# Altium footprint library Batterie_footprint.PcbLib: 67 footprints (part 1 of 5)
Each footprint in its own frame and in the unit in brackets; x right, y up, seen from the top. Pads: shape width x height; smd on the part's side, far side on the other; paste and mask are expansions set on the pad; w line width, h text height; cw(c..) or ccw(c..) is an arc to the next point about the centre after c.
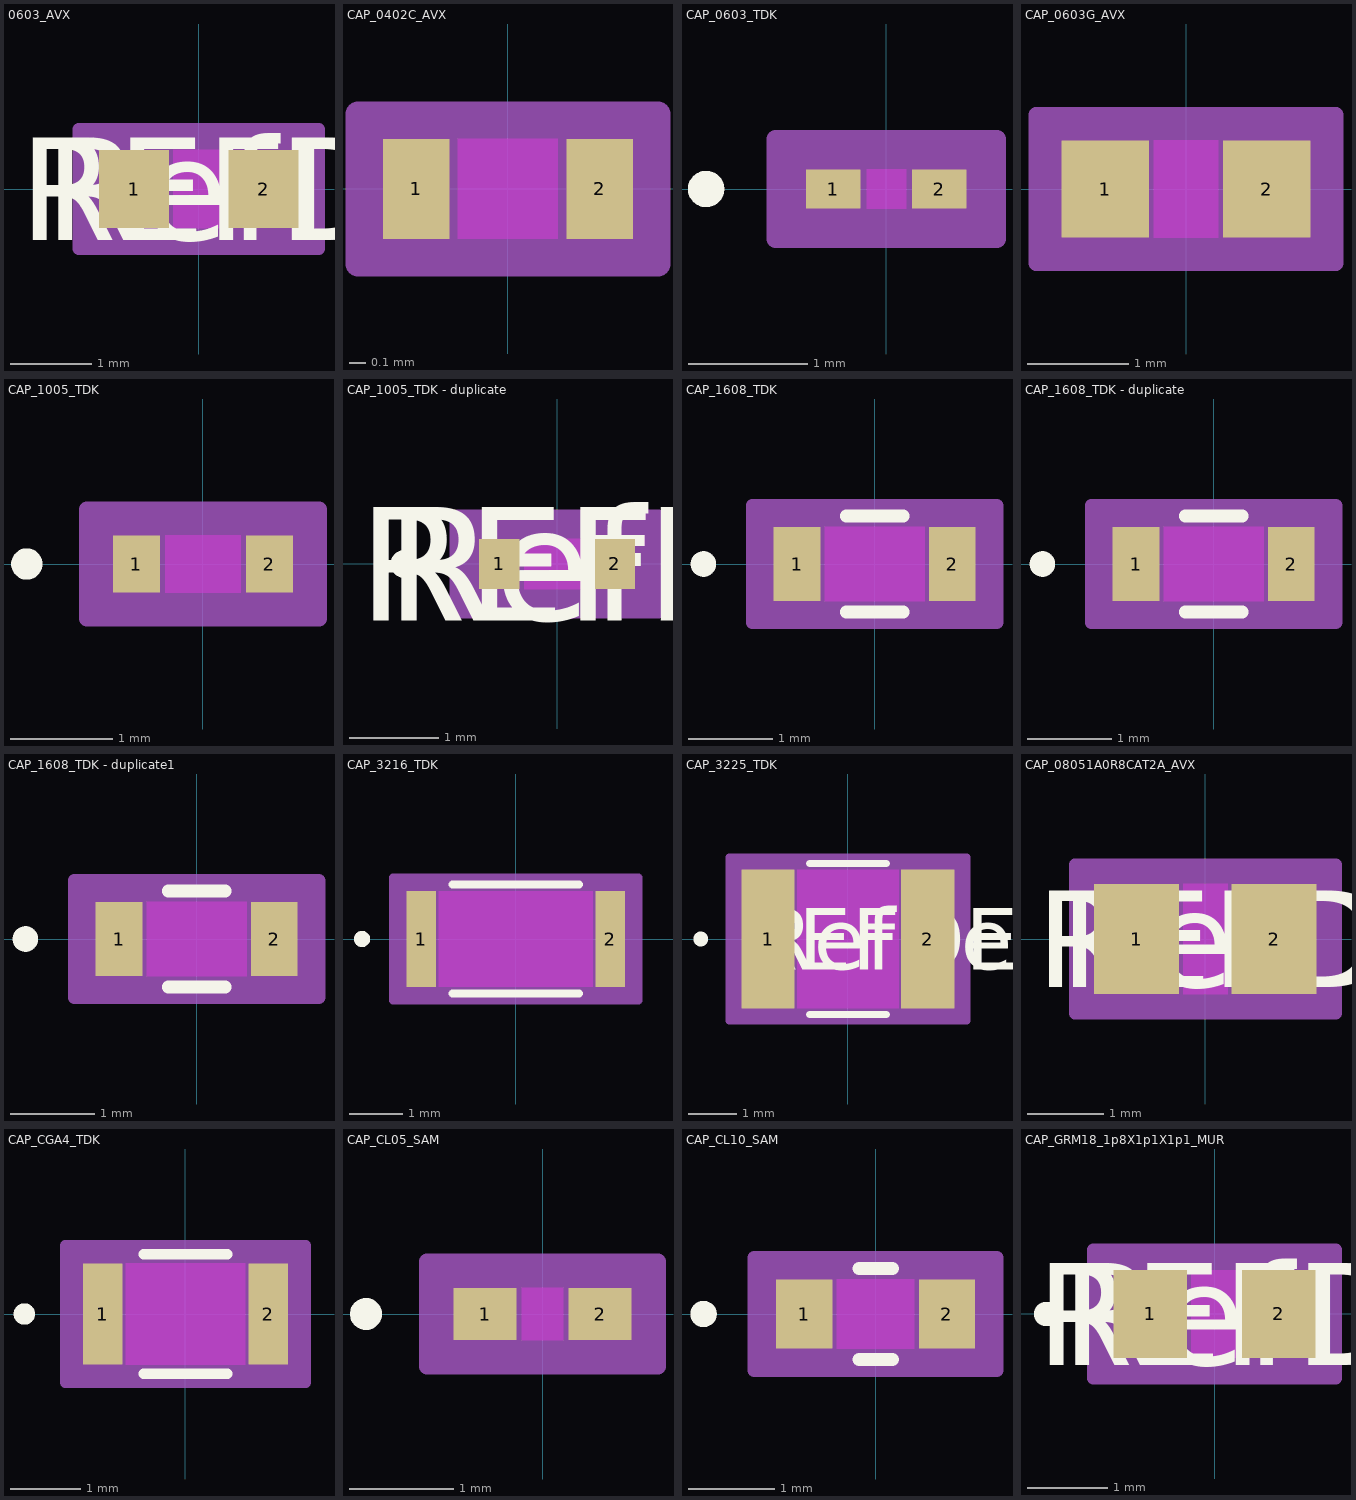
[diagram p0: the footprints below, top view; thin cyan lines are the x and y axes]

## 0603_AVX [mil]
pads (2):
  rect 34x38 smd paste+0 mask+0: 1(-31.5,0) 2(31.5,0)
Top Layer keep-out:
  region: -12.5,-17 -12.5,17 12.5,17 12.5,-17
Top Overlay:
  text "REFDES" at -87.5,-25 h50
  text "RefDes" at -75,-25 h50
Keep-Out Layer:
  region: -12.5,-19 -12.5,19 12.5,19 12.5,-19
Mechanical 13:
  lines w1: -34.5,-19 -34.5,19 ; -34.5,-19 34.5,-19 ; -34.5,-19 -14.5,-19 -14.5,19 -34.5,19 ; -34.5,-19 -34.5,19 ; -34.5,19 34.5,19 ; 34.5,-19 34.5,19 ; 34.5,-19 34.5,19 ; 34.5,-19 14.5,-19 14.5,19 34.5,19
  text "RefDes2" at -87.5,-25 h50
Mechanical 15:
  region: 58.5,-29 -58.5,-29 -58.5,29 58.5,29
  lines w6: -58.5,-29 58.5,-29 58.5,29 -58.5,29 -58.5,-29
3D body "0603_AVX.step": height 35, standoff 0, extent -34.49,-19.02 34.49,19.02

## CAP_0402C_AVX [mil]
pads (2):
  rect 16x24 smd paste+0 mask+0: 1(-22,0) 2(22,0)
Top Layer keep-out:
  region: -12,-10 -12,10 12,10 12,-10
Top Overlay:
  text ".Designator" at -137.5,-25 h50
Keep-Out Layer:
  region: -12,-12 -12,12 12,12 12,-12
Mechanical 13:
  lines w1: -22,-12 -22,12 ; -22,-12 -14,-12 -14,12 -22,12 ; -22,-12 22,-12 ; -22,-12 -22,12 ; -22,12 22,12 ; 22,-12 14,-12 14,12 22,12 ; 22,-12 22,12 ; 22,-12 22,12
  text ".Designator" at -137.5,-25 h50
Mechanical 15:
  region: 36,-18 -36,-18 -36,18 36,18
  lines w6: -36,-18 -36,18 36,18 36,-18 -36,-18
3D body "CAP_0402C_AVX.step": height 22.4, standoff 0, extent -22.01,-12.01 22.01,12.01

## CAP_0603_TDK [mil]
pads (2):
  rect 18x13 smd paste+0 mask+0: 1(-17.5,0) 2(17.5,0)
Top Layer keep-out:
  region: -6.5,-4.5 -6.5,4.5 6.5,4.5 6.5,-4.5
Top Overlay:
  circle w6: c-59.5,0 r3
  text ".Designator" at -137.5,-25 h50
Keep-Out Layer:
  region: -6.5,-6.5 -6.5,6.5 6.5,6.5 6.5,-6.5
Mechanical 13:
  circle w1: c-12.5,0 r3
  lines w1: -12.5,-6.5 -12.5,6.5 ; -12.5,-6.5 -8.5,-6.5 -8.5,6.5 -12.5,6.5 ; -12.5,-6.5 12.5,-6.5 ; -12.5,-6.5 -12.5,6.5 ; -12.5,6.5 12.5,6.5 ; 12.5,-6.5 8.5,-6.5 8.5,6.5 12.5,6.5 ; 12.5,-6.5 12.5,6.5 ; 12.5,-6.5 12.5,6.5
  text ".Designator" at -137.5,-25 h50
Mechanical 15:
  region: 36.5,-16.5 -36.5,-16.5 -36.5,16.5 36.5,16.5
  lines w6: -36.5,-16.5 -36.5,16.5 36.5,16.5 36.5,-16.5 -36.5,-16.5
3D body "CAP_0603_TDK.step": height 12.99, standoff 0, extent -12.52,-6.5 12.52,6.5

## CAP_0603G_AVX [mil]
pads (2):
  rect 34x38 smd paste+0 mask+0: 1(-31.5,0) 2(31.5,0)
Top Layer keep-out:
  region: -12.5,-17 -12.5,17 12.5,17 12.5,-17
Top Overlay:
  text ".Designator" at -137.5,-25 h50
Keep-Out Layer:
  region: -12.5,-19 -12.5,19 12.5,19 12.5,-19
Mechanical 13:
  lines w1: -34.5,-19 -34.5,19 ; -34.5,-19 -14.5,-19 -14.5,19 -34.5,19 ; -34.5,-19 34.5,-19 ; -34.5,-19 -34.5,19 ; -34.5,19 34.5,19 ; 34.5,-19 14.5,-19 14.5,19 34.5,19 ; 34.5,-19 34.5,19 ; 34.5,-19 34.5,19
  text ".Designator" at -137.5,-25 h50
Mechanical 15:
  region: 58.5,-29 -58.5,-29 -58.5,29 58.5,29
  lines w6: -58.5,-29 -58.5,29 58.5,29 58.5,-29 -58.5,-29
3D body "CAP_0603G_AVX.step": height 35, standoff 0, extent -34.49,-19.02 34.49,19.02

## CAP_1005_TDK [mil]
pads (2):
  rect 18x22 smd paste+0 mask+0: 1(-25.5,0) 2(25.5,0)
Top Layer keep-out:
  region: -14.5,-9 -14.5,9 14.5,9 14.5,-9
Top Overlay:
  circle w6: c-67.5,0 r3
  text ".Designator" at -137.5,-25 h50
Keep-Out Layer:
  region: -14.5,-11 -14.5,11 14.5,11 14.5,-11
Mechanical 13:
  circle w1: c-20.5,0 r3
  lines w1: -20.5,-11 -20.5,11 ; -20.5,-11 -16.5,-11 -16.5,11 -20.5,11 ; -20.5,-11 20.5,-11 ; -20.5,-11 -20.5,11 ; -20.5,11 20.5,11 ; 20.5,-11 16.5,-11 16.5,11 20.5,11 ; 20.5,-11 20.5,11 ; 20.5,-11 20.5,11
  text ".Designator" at -137.5,-25 h50
Mechanical 15:
  region: 44.5,-21 -44.5,-21 -44.5,21 44.5,21
  lines w6: -44.5,-21 -44.5,21 44.5,21 44.5,-21 -44.5,-21
3D body "CAP_1005_TDK.step": height 22.01, standoff 0, extent -20.51,-10.98 20.51,10.98

## CAP_1005_TDK - duplicate [mil]
pads (2):
  rect 17.78x22 smd paste+0 mask+0: 1(-25.39,0) 2(25.39,0)
Top Layer keep-out:
  region: -14.5,-9 -14.5,9 14.5,9 14.5,-9
Top Overlay:
  circle w6: c-67.28,0 r3
  text "REFDES" at -87.5,-25 h50
  text "RefDes" at -75,-25 h50
Keep-Out Layer:
  region: -14.5,-11 -14.5,11 14.5,11 14.5,-11
Mechanical 13:
  circle w0: c-20.39,0 r3
  lines w1: -20.5,-11 -20.5,11 ; -20.5,-11 20.5,-11 ; -20.5,-11 -16.5,-11 -16.5,11 -20.5,11 ; -20.5,-11 -20.5,11 ; -20.5,11 20.5,11 ; 20.5,-11 20.5,11 ; 20.5,-11 20.5,11 ; 20.5,-11 16.5,-11 16.5,11 20.5,11
  text "RefDes2" at -87.5,-25 h50
Mechanical 15:
  region: 44.28,-21 -44.28,-21 -44.28,21 44.28,21
  lines w6: -44.28,-21 44.28,-21 44.28,21 -44.28,21 -44.28,-21
3D body "CAP_1005_TDK.step": height 22.01, standoff 0, extent -20.51,-10.98 20.51,10.98

## CAP_1608_TDK [mil]
pads (2):
  rect 22x35 smd paste+0 mask+0: 1(-36.5,0) 2(36.5,0)
Top Layer keep-out:
  region: -23.5,-15.5 -23.5,15.5 23.5,15.5 23.5,-15.5
Top Overlay:
  circle w6: c-80.5,0 r3
  lines w6: -13.39,-22.5 13.39,-22.5 ; -13.39,22.5 13.39,22.5
  text ".Designator" at -137.5,-25 h50
Keep-Out Layer:
  region: -23.5,-17.5 -23.5,17.5 23.5,17.5 23.5,-17.5
Mechanical 13:
  circle w1: c-31.5,0 r3
  lines w1: -33.5,-17.5 -33.5,17.5 ; -33.5,-17.5 -25.5,-17.5 -25.5,17.5 -33.5,17.5 ; -33.5,-17.5 33.5,-17.5 ; -33.5,-17.5 -33.5,17.5 ; -33.5,17.5 33.5,17.5 ; 33.5,-17.5 25.5,-17.5 25.5,17.5 33.5,17.5 ; 33.5,-17.5 33.5,17.5 ; 33.5,-17.5 33.5,17.5
  text ".Designator" at -137.5,-25 h50
Mechanical 15:
  region: 57.5,-27.5 -57.5,-27.5 -57.5,27.5 57.5,27.5
  lines w6: -57.5,-27.5 -57.5,27.5 57.5,27.5 57.5,-27.5 -57.5,-27.5
3D body "CAP_1608_TDK.step": height 35, standoff 0, extent -33.5,-17.48 33.5,17.48

## CAP_1608_TDK - duplicate [mil]
pads (2):
  rect 22x35 smd paste+0 mask+0: 1(-36.5,0) 2(36.5,0)
Top Layer keep-out:
  region: -23.5,-15.5 -23.5,15.5 23.5,15.5 23.5,-15.5
Top Overlay:
  circle w6: c-80.5,0 r3
  lines w6: -13.39,-22.5 13.39,-22.5 ; -13.39,22.5 13.39,22.5
  text ".Designator" at -137.5,-25 h50
Keep-Out Layer:
  region: -23.5,-17.5 -23.5,17.5 23.5,17.5 23.5,-17.5
Mechanical 13:
  circle w1: c-31.5,0 r3
  lines w1: -33.5,-17.5 -33.5,17.5 ; -33.5,-17.5 -25.5,-17.5 -25.5,17.5 -33.5,17.5 ; -33.5,-17.5 33.5,-17.5 ; -33.5,-17.5 -33.5,17.5 ; -33.5,17.5 33.5,17.5 ; 33.5,-17.5 25.5,-17.5 25.5,17.5 33.5,17.5 ; 33.5,-17.5 33.5,17.5 ; 33.5,-17.5 33.5,17.5
  text ".Designator" at -137.5,-25 h50
Mechanical 15:
  region: 57.5,-27.5 -57.5,-27.5 -57.5,27.5 57.5,27.5
  lines w6: -57.5,-27.5 -57.5,27.5 57.5,27.5 57.5,-27.5 -57.5,-27.5
3D body "CAP_1608_TDK.step": height 35, standoff 0, extent -33.5,-17.48 33.5,17.48

## CAP_1608_TDK - duplicate1 [mil]
pads (2):
  rect 22x35 smd paste+0 mask+0: 1(-36.5,0) 2(36.5,0)
Top Layer keep-out:
  region: -23.5,-15.5 -23.5,15.5 23.5,15.5 23.5,-15.5
Top Overlay:
  circle w6: c-80.5,0 r3
  lines w6: -13.39,-22.5 13.39,-22.5 ; -13.39,22.5 13.39,22.5
  text ".Designator" at -137.5,-25 h50
Keep-Out Layer:
  region: -23.5,-17.5 -23.5,17.5 23.5,17.5 23.5,-17.5
Mechanical 13:
  circle w1: c-31.5,0 r3
  lines w1: -33.5,-17.5 -33.5,17.5 ; -33.5,-17.5 -25.5,-17.5 -25.5,17.5 -33.5,17.5 ; -33.5,-17.5 33.5,-17.5 ; -33.5,-17.5 -33.5,17.5 ; -33.5,17.5 33.5,17.5 ; 33.5,-17.5 25.5,-17.5 25.5,17.5 33.5,17.5 ; 33.5,-17.5 33.5,17.5 ; 33.5,-17.5 33.5,17.5
  text ".Designator" at -137.5,-25 h50
Mechanical 15:
  region: 57.5,-27.5 -57.5,-27.5 -57.5,27.5 57.5,27.5
  lines w6: -57.5,-27.5 -57.5,27.5 57.5,27.5 57.5,-27.5 -57.5,-27.5
3D body "CAP_1608_TDK.step": height 35, standoff 0, extent -33.5,-17.48 33.5,17.48

## CAP_3216_TDK [mil]
pads (2):
  rect 22x71 smd paste+0 mask+0: 1(-70,0) 2(70,0)
Top Layer keep-out:
  region: -57,-33.5 -57,33.5 57,33.5 57,-33.5
Top Overlay:
  circle w6: c-114,0 r3
  lines w6: -46.89,-40.5 46.89,-40.5 ; -46.89,40.5 46.89,40.5
  text ".Designator" at -137.5,-25 h50
Keep-Out Layer:
  region: -57,-35.5 -57,35.5 57,35.5 57,-35.5
Mechanical 13:
  circle w1: c-65,0 r3
  lines w1: -67,-35.5 -67,35.5 ; -67,-35.5 -59,-35.5 -59,35.5 -67,35.5 ; -67,-35.5 67,-35.5 ; -67,-35.5 -67,35.5 ; -67,35.5 67,35.5 ; 67,-35.5 59,-35.5 59,35.5 67,35.5 ; 67,-35.5 67,35.5 ; 67,-35.5 67,35.5
  text ".Designator" at -137.5,-25 h50
Mechanical 15:
  region: 91,-45.5 -91,-45.5 -91,45.5 91,45.5
  lines w6: -91,-45.5 -91,45.5 91,45.5 91,-45.5 -91,-45.5
3D body "CAP_3216_TDK.step": height 49.02, standoff 0, extent -67.01,-35.51 67.01,35.51

## CAP_3225_TDK [mil]
pads (2):
  rect 43x112 smd paste+0 mask+0: 1(-64.5,0) 2(64.5,0)
Top Layer keep-out:
  region: -41,-54 -41,54 41,54 41,-54
Top Overlay:
  circle w6: c-119,0 r3
  lines w6: -30.89,-61 30.89,-61 ; -30.89,61 30.89,61
  text "REFDES" at -87.5,-25 h50
  text "RefDes" at -75,-25 h50
Keep-Out Layer:
  region: -41,-56 -41,56 41,56 41,-56
Mechanical 13:
  circle w0: c-59.5,0 r3
  lines w1: -72,-56 -72,56 ; -72,-56 72,-56 ; -72,-56 -43,-56 -43,56 -72,56 ; -72,-56 -72,56 ; -72,56 72,56 ; 72,-56 72,56 ; 72,-56 72,56 ; 72,-56 43,-56 43,56 72,56
  text "RefDes2" at -87.5,-25 h50
Mechanical 15:
  region: 96,-66 -96,-66 -96,66 96,66
  lines w6: -96,-66 96,-66 96,66 -96,66 -96,-66
3D body "CAP_3225_TDK.step": height 112.01, standoff 0, extent -72.01,-55.98 72.01,55.98

## CAP_08051A0R8CAT2A_AVX [mil]
pads (2):
  rect 44x57 smd paste+0 mask+0: 1(-35.5,0) 2(35.5,0)
Top Layer keep-out:
  region: -11.5,-26.5 -11.5,26.5 11.5,26.5 11.5,-26.5
Top Overlay:
  text "RefDes" at -75,-25 h50
  text "REFDES" at -87.5,-25 h50
Keep-Out Layer:
  region: -11.5,-28.5 -11.5,28.5 11.5,28.5 11.5,-28.5
Mechanical 13:
  lines w1: -43.5,-28.5 -43.5,28.5 ; -43.5,-28.5 -13.5,-28.5 -13.5,28.5 -43.5,28.5 ; -43.5,-28.5 43.5,-28.5 ; -43.5,-28.5 -43.5,28.5 ; -43.5,28.5 43.5,28.5 ; 43.5,-28.5 13.5,-28.5 13.5,28.5 43.5,28.5 ; 43.5,-28.5 43.5,28.5 ; 43.5,-28.5 43.5,28.5
  text "RefDes2" at -87.5,-25 h50
Mechanical 15:
  region: 67.5,-38.5 -67.5,-38.5 -67.5,38.5 67.5,38.5
  lines w6: -67.5,-38.5 -67.5,38.5 67.5,38.5 67.5,-38.5 -67.5,-38.5
3D body "CAP_08051A0R8CAT2A_AVX.step": height 37.01, standoff 0, extent -43.5,-28.5 43.5,28.5

## CAP_CGA4_TDK [mil]
pads (2):
  rect 22x57 smd paste+0 mask+0: 1(-46.5,0) 2(46.5,0)
Top Layer keep-out:
  region: -33.5,-26.5 -33.5,26.5 33.5,26.5 33.5,-26.5
Top Overlay:
  circle w6: c-90.5,0 r3
  lines w6: -23.39,-33.5 23.39,-33.5 ; -23.39,33.5 23.39,33.5
  text ".Designator" at -137.5,-25 h50
Keep-Out Layer:
  region: -33.5,-28.5 -33.5,28.5 33.5,28.5 33.5,-28.5
Mechanical 13:
  circle w1: c-41.5,0 r3
  lines w1: -43.5,-28.5 -43.5,28.5 ; -43.5,-28.5 -35.5,-28.5 -35.5,28.5 -43.5,28.5 ; -43.5,-28.5 43.5,-28.5 ; -43.5,-28.5 -43.5,28.5 ; -43.5,28.5 43.5,28.5 ; 43.5,-28.5 35.5,-28.5 35.5,28.5 43.5,28.5 ; 43.5,-28.5 43.5,28.5 ; 43.5,-28.5 43.5,28.5
  text ".Designator" at -137.5,-25 h50
Mechanical 15:
  region: 67.5,-38.5 -67.5,-38.5 -67.5,38.5 67.5,38.5
  lines w6: -67.5,-38.5 -67.5,38.5 67.5,38.5 67.5,-38.5 -67.5,-38.5
3D body "CAP_CGA4_TDK.step": height 57.01, standoff 0, extent -43.5,-28.5 43.5,28.5

## CAP_CL05_SAM [mm]
pads (2):
  rect 0.6x0.5 smd paste+0 mask+0: 1(-0.55,0) 2(0.55,0)
Top Layer keep-out:
  region: -0.199,-0.199 -0.199,0.199 0.199,0.199 0.199,-0.199
Top Overlay:
  circle w0.152: c-1.688,0 r0.076
  text ".Designator" at -3.492,-0.635 h1.27
Keep-Out Layer:
  region: -0.199,-0.25 -0.199,0.25 0.199,0.25 0.199,-0.25
Mechanical 13:
  circle w0.025: c-0.423,0 r0.076
  lines w0.025: -0.5,-0.25 -0.5,0.25 ; -0.5,-0.25 0.5,-0.25 ; -0.5,-0.25 -0.25,-0.25 -0.25,0.25 -0.5,0.25 ; -0.5,-0.25 -0.5,0.25 ; -0.5,0.25 0.5,0.25 ; 0.5,-0.25 0.5,0.25 ; 0.5,-0.25 0.5,0.25 ; 0.5,-0.25 0.25,-0.25 0.25,0.25 0.5,0.25
  text ".Designator" at -3.492,-0.635 h1.27
Mechanical 15:
  region: 1.104,-0.504 -1.104,-0.504 -1.104,0.504 1.104,0.504
  lines w0.152: -1.104,-0.504 1.104,-0.504 1.104,0.504 -1.104,0.504 -1.104,-0.504
3D body "CAP_CL05_SAM.step": height 0.55, standoff 0, extent -0.5,-0.25 0.5,0.25

## CAP_CL10_SAM [mm]
pads (2):
  rect 0.65x0.8 smd paste+0 mask+0: 1(-0.825,0) 2(0.825,0)
Top Layer keep-out:
  region: -0.449,-0.349 -0.449,0.349 0.449,0.349 0.449,-0.349
Top Overlay:
  circle w0.152: c-1.988,0 r0.076
  lines w0.152: -0.192,-0.527 0.192,-0.527 ; -0.192,0.527 0.192,0.527
  text ".Designator" at -3.492,-0.635 h1.27
Keep-Out Layer:
  region: -0.449,-0.4 -0.449,0.4 0.449,0.4 0.449,-0.4
Mechanical 13:
  circle w0.025: c-0.698,0 r0.076
  lines w0.025: -0.8,-0.4 -0.8,0.4 ; -0.8,-0.4 -0.5,-0.4 -0.5,0.4 -0.8,0.4 ; -0.8,-0.4 0.8,-0.4 ; -0.8,-0.4 -0.8,0.4 ; -0.8,0.4 0.8,0.4 ; 0.8,-0.4 0.5,-0.4 0.5,0.4 0.8,0.4 ; 0.8,-0.4 0.8,0.4 ; 0.8,-0.4 0.8,0.4
  text ".Designator" at -3.492,-0.635 h1.27
Mechanical 15:
  region: 1.404,-0.654 -1.404,-0.654 -1.404,0.654 1.404,0.654
  lines w0.152: -1.404,-0.654 -1.404,0.654 1.404,0.654 1.404,-0.654 -1.404,-0.654
3D body "CAP_CL10_SAM.step": height 0.9, standoff 0, extent -0.8,-0.4 0.8,0.4

## CAP_GRM18_1p8X1p1X1p1_MUR [mil]
pads (2):
  rect 36x43 smd paste+0 mask+0: 1(-31.5,0) 2(31.5,0)
Top Layer keep-out:
  region: -11.5,-19.5 -11.5,19.5 11.5,19.5 11.5,-19.5
Top Overlay:
  circle w6: c-82.5,0 r3
  text "REFDES" at -87.5,-25 h50
  text "RefDes" at -75,-25 h50
Keep-Out Layer:
  region: -11.5,-21.5 -11.5,21.5 11.5,21.5 11.5,-21.5
Mechanical 13:
  circle w0: c-26.5,0 r3
  lines w1: -35.5,-21.5 -35.5,21.5 ; -35.5,-21.5 35.5,-21.5 ; -35.5,-21.5 -13.5,-21.5 -13.5,21.5 -35.5,21.5 ; -35.5,-21.5 -35.5,21.5 ; -35.5,21.5 35.5,21.5 ; 35.5,-21.5 35.5,21.5 ; 35.5,-21.5 35.5,21.5 ; 35.5,-21.5 13.5,-21.5 13.5,21.5 35.5,21.5
  text "RefDes2" at -87.5,-25 h50
Mechanical 15:
  region: 59.5,-31.5 -59.5,-31.5 -59.5,31.5 59.5,31.5
  lines w6: -59.5,-31.5 59.5,-31.5 59.5,31.5 -59.5,31.5 -59.5,-31.5
3D body "CAP_GRM18_1p8X1p1X1p1_MUR.step": height 42.99, standoff 0, extent -35.51,-21.5 35.51,21.5